# Altium schematic symbol library Trans.SchLib: 22 symbols
Pins are listed as number, name and electrical type; pins without a type are passive.

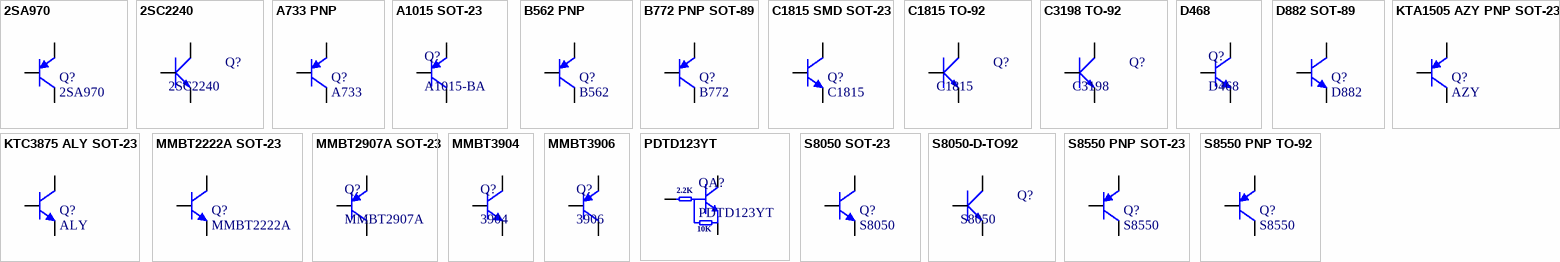
[diagram p0: symbols 2SA970 to S8550 PNP TO-92]

## 2SA970
designator Q?
PNP Audio Amplifier Transisto; Code: N/A
footprint QTO-92 (TO-92)
pins: 1 E, 2 C, 3 B

## 2SC2240
designator Q?
Low Noise Audio Amplifier Applications; Code: N/A
footprint QTO-92 (TO-92)
pins: 1 E, 2 C, 3 B

## A733 PNP
designator Q?, comment A733
Silicon PNP Epitaxial,TO-92, NXP; Code: 1702-028
footprint QTO-92 (TO-92)
pins: 1 E, 2 C, 3 B

## A1015 SOT-23
designator Q?, comment A1015-BA
PNP SMD Transistor SOT-23 2SA1015; Code: 1702-024; Value: A1015-BA
footprint SOT23_N NXP (SOT23, 3-Leads, Body 3x1.4mm, Pitch 0.95mm, IPC Medium Density)
pins: 1 B, 2 E, 3 C

## B562 PNP
designator Q?, comment B562
Silicon PNP Epitaxial,TO-92, NXP; Code: 1702-011
footprint QTO-92 (TO-92)
pins: 1 E, 2 C, 3 B

## B772 PNP SOT-89
designator Q?, comment B772
B772-PNP SMD SOT-89 Ic: -3A; Code: 1702-054; Designed by: Nhox
footprint SOT89_3 (SOT89, SOT-89, SBF-4089, SOT89A, GALI, SC-62, DF782, TO-243AA(JEDEC), 1.5mm pitch)
pins: 1 B, 2 C, 3 E

## C1815 SMD SOT-23
designator Q?, comment C1815
NPN SMD Transistor SOT23; Code: 1701-077
footprint SOT23_N NXP (SOT23, 3-Leads, Body 3x1.4mm, Pitch 0.95mm, IPC Medium Density)
pins: 1 B, 2 E, 3 C

## C1815 TO-92
designator Q?, comment C1815
NPN 150mA, ECB TO-02; Code: 1701-053
footprint QTO-92 (TO-92)
pins: 1 E, 2 C, 3 B

## C3198 TO-92
designator Q?, comment C3198
NPN 150mA, ECB TO-02; Code: N/A
footprint QTO-92 (TO-92)
pins: 1 E, 2 C, 3 B

## D468
designator Q?
D468 Transistor NPN 20V 1A TO-92; Code: N/A
footprint QTO-92 (TO-92)
pins: 1 E, 2 C, 3 B

## D882 SOT-89
designator Q?, comment D882
D882-NPN SMD Transistor SOT89, Ic: 3A; Designed by: Nhox; Code: N/A
footprint SOT89_3 (SOT89, SOT-89, SBF-4089, SOT89A, GALI, SC-62, DF782, TO-243AA(JEDEC), 1.5mm pitch)
pins: 1 B, 2 C, 3 E

## KTA1505 AZY PNP SOT-23
designator Q?, comment AZY
ASY-PNP SMD SOT-23 Ic: -150mA, Ib -30mA,Hfe: 120~240, Ft: 80Mhz; Code: 1702-056; Designed by: Nhox
footprint SOT23_N NXP (SOT23, 3-Leads, Body 3x1.4mm, Pitch 0.95mm, IPC Medium Density)
pins: 1 B, 2 E, 3 C

## KTC3875 ALY SOT-23
designator Q?, comment ALY
ALY-NPN SMD Transistor SOT23, Ic: 150mA, Ib 30mA, Hfe: 120~240, Ft: 80MHz; Code: 1701-109; Designed by: Nhox
footprint SOT23_N NXP (SOT23, 3-Leads, Body 3x1.4mm, Pitch 0.95mm, IPC Medium Density)
pins: 1 B, 2 E, 3 C

## MMBT2222A SOT-23
designator Q?, comment MMBT2222A
NPN General Purpose Amplifier; Code: 1701-062
footprint SOT23_N NXP (SOT23, 3-Leads, Body 3x1.4mm, Pitch 0.95mm, IPC Medium Density)
pins: 1 B, 2 E, 3 C

## MMBT2907A SOT-23
designator Q?, comment MMBT2907A
PNP; Code: 1702-013
footprint SOT23_N NXP (SOT23, 3-Leads, Body 3x1.4mm, Pitch 0.95mm, IPC Medium Density)
pins: 1 B, 2 E, 3 C

## MMBT3904
designator Q?, comment 3904
Vce max: 40V, Ic max: 0.2A, P: 0.3W; Code: 1701-065; Designed by: nhox
footprint SOT23_N NXP (SOT23, 3-Leads, Body 3x1.4mm, Pitch 0.95mm, IPC Medium Density)
pins: 1 B, 2 E, 3 C

## MMBT3906
designator Q?, comment 3906
40V PNP SMALL SIGNAL TRANSISTOR; Code: 1702-002; Designed by: TranLuyen
footprint SOT23_N NXP (SOT23, 3-Leads, Body 3x1.4mm, Pitch 0.95mm, IPC Medium Density)
pins: 1 B, 2 E, 3 C

## PDTD123YT
designator QA?
NPN Transistor PDTD123YT 215; Code: 1701-082
footprint SOT23_N NXP (SOT23, 3-Leads, Body 3x1.4mm, Pitch 0.95mm, IPC Medium Density)
pins: 1 B, 2 E, 3 C
text: 2.2K; 10K

## S8050 SOT-23
designator Q?, comment S8050
J3Y-NPN SMD Transistor SOT23; Code: 1701-070
footprint SOT23_N NXP (SOT23, 3-Leads, Body 3x1.4mm, Pitch 0.95mm, IPC Medium Density)
pins: 1 B, 2 E, 3 C

## S8050-D-TO92
designator Q?, comment S8050
NPN 500mA, EBC NPN TO-92; Code: 1701-029
footprint QTO-92 (TO-92)
pins: 1 E, 2 B, 3 C

## S8550 PNP SOT-23
designator Q?, comment S8550
2TY-PNP SMD SOT-23 500mA; Code: 1702-035; Designed by: TranLuyen
footprint SOT23_N NXP (SOT23, 3-Leads, Body 3x1.4mm, Pitch 0.95mm, IPC Medium Density)
pins: 1 B, 2 E, 3 C

## S8550 PNP TO-92
designator Q?, comment S8550
PNP TO-92 500mA; Code: 1702-035; Designed by: TranLuyen
footprint QTO-92 (TO-92)
pins: 1 E, 2 B, 3 C